# Altium schematic symbol library Centralize.SchLib: 1081 symbols (part 8 of 26)
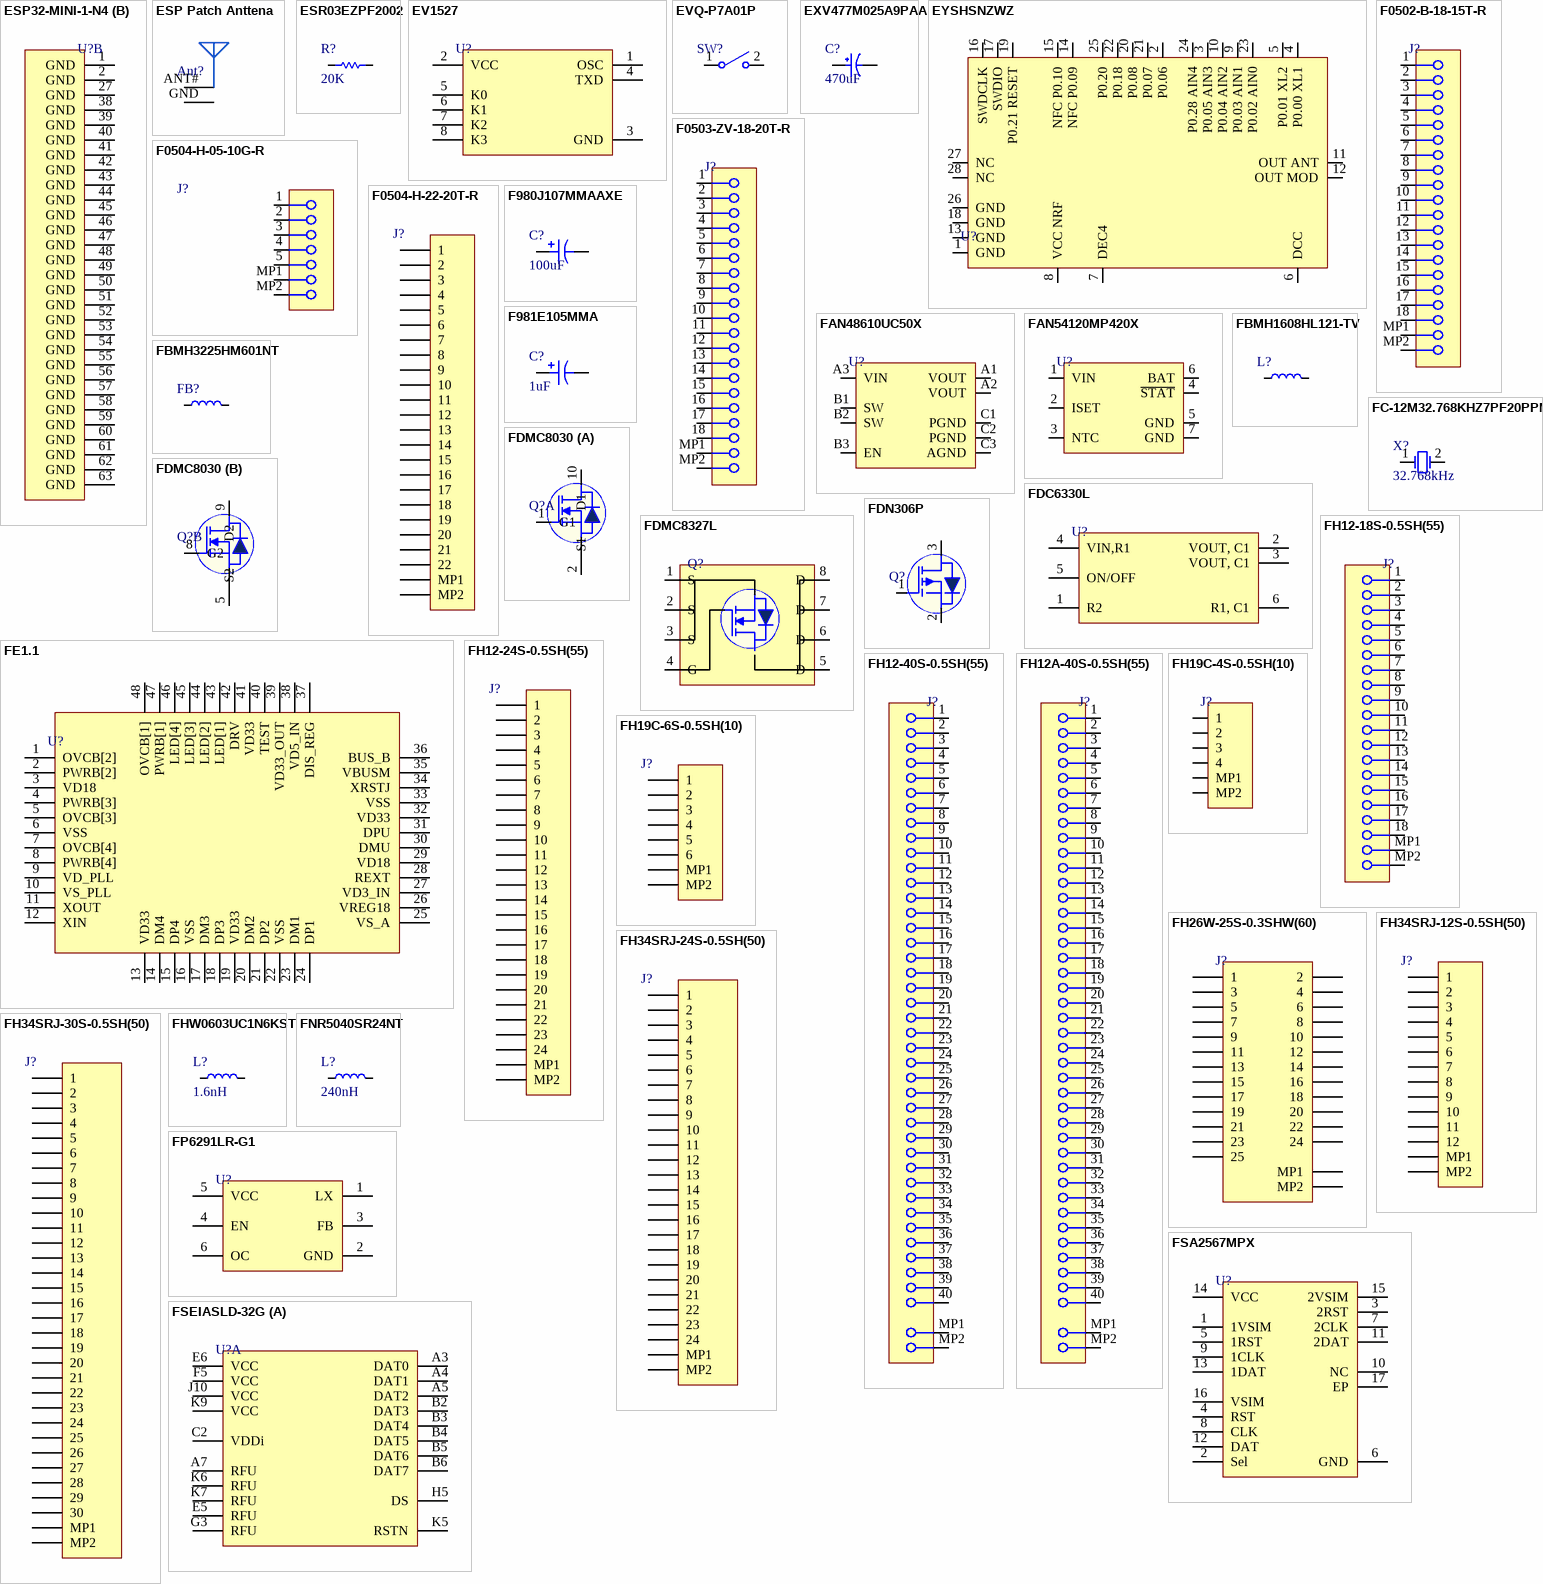
[diagram p54: symbols ESP32-MINI-1-N4 to FSEIASLD-32G]

## FDMC8030
designator Q?
MOSFET 2N-CH 40V 12A 8POWER33; Manufacturer: ON Semiconductor / Fairchild; Manufacturer Part Number: FDMC8030; Rise Time: 3ns; Rds On Max: 10mR; Input Capacitance: 1.975nF; Power Dissipation: 800mW; Turn-On Delay Time: 7ns; Turn-Off Delay Time: 19ns; Element Configuration: Dual; Gate to Source Voltage (Vgs): 12V; FET Type: 2 N-Channel; Polarity: N-CHANNEL; Number of Elements: 1; Supplier 1: Future Electronics; RoHS: Yes; Category: Uncategorized; Pricing 1: 3000=0.59500, 6000=0.57500 (USD); Mount: Surface Mount; Number of Pins: 8; Weight: 0.196g; Min Operating Temperature: -55°C; Max Operating Temperature: 150°C; Packaging: Tape and Reel; Package Quantity: 3000; Continuous Drain Current (ID): 12A; Drain to Source Breakdown Voltage: 40V; Drain to Source Resistance: 10mR; Drain to Source Voltage (Vdss): 40V; Max Power Dissipation: 800mW; Fall Time: 3ns; Series: PowerTrench®; Length: 3mm; Width: 3mm; Height: 0.75mm; Radiation Hardening: No; RoHS Compliant: Yes; ComponentLink1URL: https://datasheet.ciiva.com/11175/fdmc8030-11175489.pdf?src-supplier=Avnet; ComponentLink1Description: https://datasheet.ciiva.com/11175/fdmc8030-11175489.pdf?src-supplier=Avnet; ComponentLink2URL: https://datasheet.ciiva.com/4439/fdmc8030-103806-4439986.pdf?src-supplier=Mouser; ComponentLink2Description: https://datasheet.ciiva.com/4439/fdmc8030-103806-4439986.pdf?src-supplier=Mouser; ComponentLink3URL: https://datasheet.ciiva.com/15044/fdmc8030-15044346.pdf?src-supplier=Digi-Key; ComponentLink3Description: https://datasheet.ciiva.com/15044/fdmc8030-15044346.pdf?src-supplier=Digi-Key; Supplier Part Number 1: 4079668; LCSC Part Number: C890952; Item Type: Mosfet
footprint 8-Power33 (3x3)
part A pins: 1 G1, 2 S1, 10 D1
part B pins: 5 S2, 8 G2, 9 D2

## FDMC8327L
designator Q?
POWER FIELD-EFFECT TRANSISTOR, 1; Manufacturer: ON Semiconductor / Fairchild; Manufacturer Part Number: FDMC8327L; Rds On Max: 9.7mR; Input Capacitance: 1.85nF; Rise Time: 2.2ns; Drain to Source Voltage (Vdss): 40V; Continuous Drain Current (ID): 14A; Max Power Dissipation: 30W; Gate to Source Voltage (Vgs): 20V; Number of Elements: 1; Turn-On Delay Time: 8.4ns; Turn-Off Delay Time: 20ns; Threshold Voltage: 1.7V; Element Configuration: Single; Polarity: N-CHANNEL; Item Type: Mosfet; Supplier 1: RSComponents; RoHS: Yes; Category: Uncategorized; Stock 1: 12000; Pricing 1: 10=1.13200, 100=0.79800, 500=0.71800, 1000=0.59800 (GBP); Mount: Surface Mount; Number of Pins: 8; Weight: 0.18g; Min Operating Temperature: -55°C; Max Operating Temperature: 150°C; Package Quantity: 1; Packaging: Tape and Reel; Drain to Source Breakdown Voltage: 40V; Drain to Source Resistance: 9.7mR; Power Dissipation: 30W; Fall Time: 2.2ns; Series: PowerTrench®; Length: 3.3mm; Width: 3.3mm; Height: 0.75mm; Radiation Hardening: No; Reach SVHC Compliant: Yes; RoHS Compliant: Yes; ComponentLink1URL: https://datasheet.ciiva.com/13060/fdmc8327l-103580-13060051.pdf?src-supplier=Mouser; ComponentLink1Description: https://datasheet.ciiva.com/13060/fdmc8327l-103580-13060051.pdf?src-supplier=Mouser; ComponentLink2URL: https://datasheet.ciiva.com/29752/fdmc8327l-29752225.pdf?src-supplier=Digi-Key; ComponentLink2Description: https://datasheet.ciiva.com/29752/fdmc8327l-29752225.pdf?src-supplier=Digi-Key; ComponentLink3URL: https://datasheet.ciiva.com/7967/1774752-7967973.pdf?src-supplier=Element14; ComponentLink3Description: https://datasheet.ciiva.com/7967/1774752-7967973.pdf?src-supplier=Element14; ComponentLink4URL: https://datasheet.ciiva.com/29752/fdmc8327l-29752230.pdf?src-supplier=Digi-Key; ComponentLink4Description: https://datasheet.ciiva.com/29752/fdmc8327l-29752230.pdf?src-supplier=Digi-Key; ComponentLink5URL: https://datasheet.ciiva.com/11175/fdmc8327l-11175500.pdf?src-supplier=Avnet; ComponentLink5Description: https://datasheet.ciiva.com/11175/fdmc8327l-11175500.pdf?src-supplier=Avnet; ComponentLink6URL: https://datasheet.ciiva.com/29752/fdmc8327l-29752220.pdf?src-supplier=Digi-Key; ComponentLink6Description: https://datasheet.ciiva.com/29752/fdmc8327l-29752220.pdf?src-supplier=Digi-Key; Supplier Part Number 1: 8648203P; LCSC Part Number: *
footprint 8-MLP (3.3x3.3)
pins: 1 S, 2 S, 3 S, 4 G, 5 D, 6 D, 7 D, 8 D

## FDN306P
designator Q?
MOSFET P-CH 12V 2.6A SUPERSOT3; Manufacturer: ON Semiconductor / Fairchild; Manufacturer Part Number: FDN306P; Rds On Max: 40mR; Input Capacitance: 1.138nF; Max Power Dissipation: 500mW; Gate to Source Voltage (Vgs): 8V; Number of Elements: 1; Turn-Off Delay Time: 38ns; Turn-On Delay Time: 11ns; Element Configuration: Single; Rise Time: 10ns; Threshold Voltage: -600mV; Drain to Source Breakdown Voltage: -12V; Polarity: P-CHANNEL; Current Rating: -2.6A; Current: 26A; Supplier 1: Digi-Key; RoHS: Yes; Category: MOSFETs; Stock 1: 12409; Pricing 1: 1=0.59000, 10=0.50700, 25=0.47360, 100=0.37880, 500=0.29766, 1000=0.23001 (USD); Mount: Surface Mount; Case/Package: TO-236-3; Number of Pins: 3; Contact Plating: Tin,Matte; Min Operating Temperature: -55°C; Max Operating Temperature: 150°C; Packaging: Tape and Reel; Package Quantity: 3000; Drain to Source Voltage (Vdss): 12V; Continuous Drain Current (ID): 2.6A; Drain to Source Resistance: 40mR; Power Dissipation: 500mW; Series: PowerTrench®; Fall Time: 10ns; Nominal Vgs: -600mV; On-State Resistance: 40MR; Drain-source On Resistance-Max: 40MR; Dual Supply Voltage: -12V; Termination: SMD/SMT; Voltage Rating (DC): -12V; Voltage: 12V; Length: 2.92mm; Width: 1.4mm; Height: 0.94mm; Radiation Hardening: No; REACH SVHC: No SVHC; RoHS Compliant: Yes; Lead Free: Lead Free; ComponentLink1URL: https://datasheet.ciiva.com/6383/fdn306p-6383301.pdf?src-supplier=Digi-Key; ComponentLink1Description: https://datasheet.ciiva.com/6383/fdn306p-6383301.pdf?src-supplier=Digi-Key; ComponentLink2URL: https://datasheet.ciiva.com/4439/fdn306p-50876-4439911.pdf?src-supplier=Mouser; ComponentLink2Description: https://datasheet.ciiva.com/4439/fdn306p-50876-4439911.pdf?src-supplier=Mouser; ComponentLink3URL: https://datasheet.ciiva.com/27050/889760-27050636.pdf?src-supplier=Jameco; ComponentLink3Description: https://datasheet.ciiva.com/27050/889760-27050636.pdf?src-supplier=Jameco; ComponentLink4URL: https://datasheet.ciiva.com/14170/fdn306p-eng-tds-14170925.pdf?src-supplier=Distrelec; ComponentLink4Description: https://datasheet.ciiva.com/14170/fdn306p-eng-tds-14170925.pdf?src-supplier=Distrelec; ComponentLink5URL: https://datasheet.ciiva.com/22700/264983-22700885.pdf?src-supplier=Element14; ComponentLink5Description: https://datasheet.ciiva.com/22700/264983-22700885.pdf?src-supplier=Element14; ComponentLink6URL: https://datasheet.ciiva.com/26144/fdn306p-26144214.pdf?src-supplier=Avnet+Europe; ComponentLink6Description: https://datasheet.ciiva.com/26144/fdn306p-26144214.pdf?src-supplier=Avnet+Europe; ComponentLink7URL: https://datasheet.ciiva.com/6383/fdn306p-6383304.pdf?src-supplier=Digi-Key; ComponentLink7Description: https://datasheet.ciiva.com/6383/fdn306p-6383304.pdf?src-supplier=Digi-Key; ComponentLink8URL: https://datasheet.ciiva.com/11175/fdn306p-11175160.pdf?src-supplier=Avnet; ComponentLink8Description: https://datasheet.ciiva.com/11175/fdn306p-11175160.pdf?src-supplier=Avnet; ComponentLink9URL: https://datasheet.ciiva.com/6383/fdn306p-6383306.pdf?src-supplier=Digi-Key; ComponentLink9Description: https://datasheet.ciiva.com/6383/fdn306p-6383306.pdf?src-supplier=Digi-Key; ComponentLink10URL: https://datasheet.ciiva.com/17275/fdn306p-17275114.pdf?src-supplier=Future+Electronics; ComponentLink10Description: https://datasheet.ciiva.com/17275/fdn306p-17275114.pdf?src-supplier=Future+Electronics; ComponentLink11URL: https://datasheet.ciiva.com/22655/fdn306p-22655327.pdf?src-supplier=Element14; ComponentLink11Description: https://datasheet.ciiva.com/22655/fdn306p-22655327.pdf?src-supplier=Element14; Supplier Part Number 1: FDN306PCT-ND; LCSC Part Number: C154510
footprint SOT-23 (TRANS NPN 40V 0.6A SOT23)
pins: 1 G, 2 S, 3 D

## FE1.1
designator U?
LQFP-48_7x7x05P USB ICs ROHS; Manufacturer: Terminus Tech; Manufacturer Part Number: FE1.1; Item Type: IC; Package: LQFP-48_7x7x05P; LCSC Part Number: C28958; ComponentLink1Description: LCSC; ComponentLink1URL: https://www.lcsc.com/product-detail/USB-ICs_Terminus-Tech-FE1-1_C28958.html
footprint 48-LQFP (7x7)_
pins: 1 OVCB[2], 2 PWRB[2], 3 VD18, 4 PWRB[3] , 5 OVCB[3], 6 VSS , 7 OVCB[4] , 8 PWRB[4] , 9 VD_PLL , 10 VS_PLL , 11 XOUT, 12 XIN, 13 VD33 , 14 DM4, 15 DP4, 16 VSS , 17 DM3, 18 DP3 , 19 VD33, 20 DM2, 21 DP2, 22 VSS, 23 DM1, 24 DP1, 25 VS_A, 26 VREG18, 27 VD3_IN, 28 REXT, 29 VD18, 30 DMU, 31 DPU, 32 VD33, 33 VSS, 34 XRSTJ, 35 VBUSM, 36 BUS_B, 37 DIS_REG, 38 VD5_IN, 39 VD33_OUT, 40 TEST, 41 VD33, 42 DRV, 43 LED[1], 44 LED[2], 45 LED[3], 46 LED[4], 47 PWRB[1], 48 OVCB[1]

## FH12-18S-0.5SH(55)
designator J?
CONN FFC BOTTOM 18POS 0.5MM R/A; Manufacturer: Hirose; Manufacturer Part Number: FH12-18S-0.5SH(55); Item Type: FPC Connector; Supplier: Future Electronics; Supplier Part Number: 3036611; RoHS: Yes; Category: FFC / FPC; Stock: 2000; Pricing: 2000=1.08 (USD); ComponentLink1URL: https://datasheet.ciiva.com/15176/getdatasheetpartid-437464-15176850.pdf?src-supplier=Verical; ComponentLink1Description: https://datasheet.ciiva.com/15176/getdatasheetpartid-437464-15176850.pdf?src-supplier=Verical; ComponentLink2URL: https://datasheet.ciiva.com/22630/58803-22630341.pdf?src-supplier=Farnell; ComponentLink2Description: https://datasheet.ciiva.com/22630/58803-22630341.pdf?src-supplier=Farnell; LCSC Part Number: C506792
footprint FH12-18S-0.5SH(55)
pins: 1, 2, 3, 4, 5, 6, 7, 8, 9, 10, 11, 12, 13, 14, 15, 16, 17, 18, MP1, MP2

## FH12-24S-0.5SH(55)
designator J?
CONN FFC BOTTOM 24POS 0.50MM R/A; Manufacturer: Hirose; Manufacturer Part Number: FH12-24S-0.5SH(55); Item Type: FFC Connector; Supplier 1: RSComponents; RoHS: Yes; Category: FFC / FPC; Stock 1: 30; Pricing 1: 5=0.91700, 100=0.76200, 375=0.63900, 1500=0.59600, 3000=0.55300 (USD); ComponentLink1URL: https://datasheet.ciiva.com/15176/getdatasheetpartid-439675-15176853.pdf?src-supplier=Verical; ComponentLink1Description: https://datasheet.ciiva.com/15176/getdatasheetpartid-439675-15176853.pdf?src-supplier=Verical; ComponentLink2URL: https://datasheet.ciiva.com/22630/58803-22630351.pdf?src-supplier=Farnell; ComponentLink2Description: https://datasheet.ciiva.com/22630/58803-22630351.pdf?src-supplier=Farnell; ComponentLink3URL: https://datasheet.ciiva.com/5137/ed-fh12-20140305-355586-5137161.pdf?src-supplier=Mouser; ComponentLink3Description: https://datasheet.ciiva.com/5137/ed-fh12-20140305-355586-5137161.pdf?src-supplier=Mouser; ComponentLink4URL: https://datasheet.ciiva.com/22697/58803-22697094.pdf?src-supplier=Element14; ComponentLink4Description: https://datasheet.ciiva.com/22697/58803-22697094.pdf?src-supplier=Element14; ComponentLink5URL: https://datasheet.ciiva.com/7661/58803-7661382.pdf?src-supplier=Element14; ComponentLink5Description: https://datasheet.ciiva.com/7661/58803-7661382.pdf?src-supplier=Element14; Supplier Part Number 1: 7388827; LCSC Part Number: C202112
footprint FH12-24S-0.5SH(55)_
pins: 1, 2, 3, 4, 5, 6, 7, 8, 9, 10, 11, 12, 13, 14, 15, 16, 17, 18, 19, 20, 21, 22, 23, 24, MP1, MP2

## FH12-40S-0.5SH(55)
designator J?
CONN FFC BOTTOM 40POS 0.50MM R/A; Manufacturer: Hirose; Manufacturer Part Number: FH12-40S-0.5SH(55); Connector Type: CARD EDGE CONNECTOR; Option: General Purpose; Filter Feature: No; Number of Rows Loaded: 1; Number of Contacts: 40; Contact Pattern: RECTANGULAR; Contact Resistance: 50mR; Contact Style: BELLOWED TYPE; Dielectric Withstanding Voltage (AC): 150V; Durability: 20Cycles; Insulation Resistance: 500MR; Rated Current (Signal): 400mA; Body Breadth: 0.079inch; Body Depth: 0.22inch; Body Length: 0.949inch; Mating Contact Pitch: 0.02inch; Mounting Option 1: EJECT LEVER; Mounting Option 2: LOCKING; Reference Standard: UL; Reliability: COMMERCIAL; Item Type: Connector; Supplier 1: Digi-Key; RoHS: Yes; Category: FFC / FPC; Stock 1: 11247; Pricing 1: 1=3.00000, 10=2.72800, 25=2.58400, 50=2.52400, 100=2.40380, 250=2.10332, 500=2.04324, 1000=1.74276 (USD); Mounting Technology: Board; Contact Finish - Mating: NOT SPECIFIED; Contact Finish - Termination: Nickel/Gold (Ni/Au); Insulation Color: Beige; Insulation Material: Polyamide; Min Operating Temperature: -40°C; Max Operating Temperature: 70°C; JESD-609 Code: e4; Contact Gender: Female; Mixed Contacts: No; Mounting Style: RIGHT ANGLE; Termination: SMD/SMT; Number Of PCB Rows: 1; PCB Contact Pattern: RECTANGULAR; Terminal Pitch: 0.5mm; Flammability Rating: UL94 V-0; RoHS Compliant: Yes; DIN Conformance: No; IEC Conformance: No; MIL Conformance: No; Reach SVHC Compliant: Yes; ComponentLink1URL: https://datasheet.ciiva.com:443/pdfs/VipMasterIC/IC/HIRO/HIRO-S-A0003089604/HIRO-S-A0008599618-1.pdf?src-supplier=IHS+Markit; ComponentLink1Description: https://datasheet.ciiva.com:443/pdfs/VipMasterIC/IC/HIRO/HIRO-S-A0003089604/HIRO-S-A0008599618-1.pdf?src-supplier=IHS+Markit; ComponentLink2URL: https://datasheet.ciiva.com/11745/0900766b80d985fc-11745617.pdf?src-supplier=RSComponents; ComponentLink2Description: https://datasheet.ciiva.com/11745/0900766b80d985fc-11745617.pdf?src-supplier=RSComponents; ComponentLink3URL: https://datasheet.ciiva.com/15176/getdatasheetpartid-432539-15176843.pdf?src-supplier=Verical; ComponentLink3Description: https://datasheet.ciiva.com/15176/getdatasheetpartid-432539-15176843.pdf?src-supplier=Verical; ComponentLink4URL: https://datasheet.ciiva.com/7661/58803-7661389.pdf?src-supplier=Element14; ComponentLink4Description: https://datasheet.ciiva.com/7661/58803-7661389.pdf?src-supplier=Element14; Supplier Part Number 1: 26-FH12-40S-0.5SH(55)CT-ND; LCSC Part Number: C202114
footprint FH12-40S-0.5SH(55)
pins: 1, 2, 3, 4, 5, 6, 7, 8, 9, 10, 11, 12, 13, 14, 15, 16, 17, 18, 19, 20, 21, 22, 23, 24, 25, 26, 27, 28, 29, 30, 31, 32, 33, 34, 35, 36, 37, 38, 39, 40, MP1, MP2

## FH12A-40S-0.5SH(55)
designator J?
CONN FFC TOP 40POS 0.50MM R/A; Manufacturer: Hirose; Manufacturer Part Number: FH12A-40S-0.5SH(55); Connector Type: CARD EDGE CONNECTOR; Option: General Purpose; Contact Pattern: RECTANGULAR; Contact Style: BELLOWED TYPE; Filter Feature: No; Number Of PCB Rows: 1; Number of Contacts: 40; Board Mounting Option: SOLDER HOLDING POSTS; Contact Resistance: 50mR; Dielectric Withstanding Voltage (AC): 150V; Durability: 20Cycles; Insulation Resistance: 500MR; Rated Current (Signal): 500mA; Additional Feature: ROHS COMPLIANT; Body Breadth: 0.079inch; Body Length: 0.965inch; Mating Contact Pitch: 0.02inch; Mounting Option 1: LOCKING; Body Depth: 0.276inch; Reference Standard: UL; Reliability: COMMERCIAL; Item Type: FFC Connector; Supplier 1: Rs; RoHS: Yes; Category: FFC / FPC; Stock 1: 1020; Pricing 1: 200=1.21900, 750=1.09200, 3000=0.99700, 6000=0.89700 (GBP); Mounting Technology: Board; Contact Material: Bronze; Contact Finish - Mating: GOLD (8); Contact Finish - Termination: Gold (Au) - with Nickel (Ni) barrier; Insulation Color: Beige; Insulation Material: Polyamide; Min Operating Temperature: -40°C; Max Operating Temperature: 85°C; JESD-609 Code: e4; Contact Gender: Female; Mixed Contacts: No; Mounting Style: RIGHT ANGLE; Number of Rows Loaded: 1; PCB Contact Pattern: RECTANGULAR; Termination: SMD/SMT; Terminal Pitch: 0.5mm; Flammability Rating: UL94 V-0; RoHS Compliant: Yes; DIN Conformance: No; IEC Conformance: No; MIL Conformance: No; Reach SVHC Compliant: Yes; ComponentLink1URL: https://datasheet.ciiva.com:443/pdfs/VipMasterIC/IC/HIRO/HIRO-S-A0001800623/HIRO-S-A0003173477-1.pdf?src-supplier=IHS+Markit; ComponentLink1Description: https://datasheet.ciiva.com:443/pdfs/VipMasterIC/IC/HIRO/HIRO-S-A0001800623/HIRO-S-A0003173477-1.pdf?src-supplier=IHS+Markit; ComponentLink2URL: https://datasheet.ciiva.com/14667/0900766b80806912-14667338.pdf?src-supplier=Rs; ComponentLink2Description: https://datasheet.ciiva.com/14667/0900766b80806912-14667338.pdf?src-supplier=Rs; ComponentLink3URL: https://datasheet.ciiva.com/15176/getdatasheetpartid-432540-15176844.pdf?src-supplier=Verical; ComponentLink3Description: https://datasheet.ciiva.com/15176/getdatasheetpartid-432540-15176844.pdf?src-supplier=Verical; ComponentLink4URL: https://datasheet.ciiva.com/11745/0900766b80d985fc-11745193.pdf?src-supplier=Rs; ComponentLink4Description: https://datasheet.ciiva.com/11745/0900766b80d985fc-11745193.pdf?src-supplier=Rs; Supplier Part Number 1: 6882839P; LCSC Part Number: C506795
footprint FH12A-40S-0.5SH(55)
pins: 1, 2, 3, 4, 5, 6, 7, 8, 9, 10, 11, 12, 13, 14, 15, 16, 17, 18, 19, 20, 21, 22, 23, 24, 25, 26, 27, 28, 29, 30, 31, 32, 33, 34, 35, 36, 37, 38, 39, 40, MP1, MP2

## FH19C-4S-0.5SH(10)
designator J?
CONN FFC BOTTOM 4POS 0.5MM R/A; Manufacturer: Hirose; Manufacturer Part Number: FH19C-4S-0.5SH(10); Actuator Material: Polymer,Polyphenylene,Liquid Crystal Polymer; Voltage Rating: 50V; Current Rating: 500mA; Number of Positions: 4; Insulation Resistance: 500MR; Wire/Cable Type: Flat Flex; Pitch: 0.02inch; Item Type: FPC Connector; Supplier 1: Digi-Key; RoHS: Yes; Category: FFC / FPC; Stock 1: 7956; Pricing 1: 1=1.08, 10=0.916, 25=0.878, 50=0.8596, 100=0.8221, 250=0.7474, 500=0.67266, 1000=0.59792, 2500=0.54186 (USD); Mounting Technology: Surface Mount; Contact Material: Bronze; Contact Plating: Gold; Housing Material: Polymer; Min Operating Temperature: -55°C; Max Operating Temperature: 85°C; Packaging: Tape and Reel; Package Quantity: 5000; Termination: Solder; Series: FH19C; Flammability Rating: UL94 V-0; RoHS Compliant: Yes; ComponentLink1URL: https://datasheet.ciiva.com/18563/ed-fh19cfh19sc-20140305-18563548.pdf?src-supplier=Digi-Key; ComponentLink1Description: https://datasheet.ciiva.com/18563/ed-fh19cfh19sc-20140305-18563548.pdf?src-supplier=Digi-Key; Supplier Part Number 1: H125822CT-ND; LCSC Part Number: C424650
footprint FH19C-4S-0.5SH(10)
pins: 1, 2, 3, 4, MP1, MP2

## FH19C-6S-0.5SH(10)
designator J?
CONN FFC BOTTOM 6POS 0.50MM R/A; Manufacturer: Hirose; Manufacturer Part Number: FH19C-6S-0.5SH(10); Item Type: FFC Connector; Supplier 1: Digi-Key; RoHS: Yes; Category: FFC / FPC; Stock 1: 4697; Pricing 1: 1=1.10000, 10=0.96900, 25=0.91200, 50=0.87400, 100=0.83600, 250=0.76000, 500=0.68400, 1000=0.60800, 2500=0.55100 (USD); ComponentLink1URL: https://datasheet.ciiva.com/18563/ed-fh19cfh19sc-20140305-18563530.pdf?src-supplier=Digi-Key; ComponentLink1Description: https://datasheet.ciiva.com/18563/ed-fh19cfh19sc-20140305-18563530.pdf?src-supplier=Digi-Key; Supplier Part Number 1: H125824CT-ND; LCSC Part number: C424651
footprint FH19C-6S-0.5SH(10)_
pins: 1, 2, 3, 4, 5, 6, MP1, MP2

## FH26W-25S-0.3SHW(60)
designator J?
CONN FPC BOTTOM 25POS 0.3MM R/A; Manufacturer: Hirose; Manufacturer Part Number: FH26W-25S-0.3SHW(60); Item Type: FPC Connector; Supplier 1: Future Electronics; RoHS: Yes; Category: FFC / FPC; Stock 1: 5000; Pricing 1: 5000=0.85500 (USD); ComponentLink1URL: https://www.hirose.com/product/en/download_file/key_name/FH26/category/Catalog/doc_file_id/49355/?file_category_id=4&item_id=298&is_series=1&src-supplier=Digi-Key; ComponentLink1Description: https://www.hirose.com/product/en/download_file/key_name/FH26/category/Catalog/doc_file_id/49355/?file_category_id=4&item_id=298&is_series=1&src-supplier=Digi-Key; ComponentLink2URL: https://www.hirose.com/product/download/?distributor=digikey&amp;type=2d&amp;lang=en&amp;num=FH26W-13S-0.3SHW(60)&src-supplier=Digi-Key; ComponentLink2Description: https://www.hirose.com/product/download/?distributor=digikey&amp;type=2d&amp;lang=en&amp;num=FH26W-13S-0.3SHW(60)&src-supplier=Digi-Key; ComponentLink3URL: https://www.hirose.com/product/download/?distributor=digikey&amp;type=specSheet&amp;lang=en&amp;num=FH26W-25S-0.3SHW(60)&src-supplier=Digi-Key; ComponentLink3Description: https://www.hirose.com/product/download/?distributor=digikey&amp;type=specSheet&amp;lang=en&amp;num=FH26W-25S-0.3SHW(60)&src-supplier=Digi-Key; Supplier Part Number 1: 6089120; LCSC Part Number: C2904698
footprint FH26W-25S-0.3SHW(60)
pins: 1, 2, 3, 4, 5, 6, 7, 8, 9, 10, 11, 12, 13, 14, 15, 16, 17, 18, 19, 20, 21, 22, 23, 24, 25, MP1, MP2

## FH34SRJ-12S-0.5SH(50)
designator J?
CONN FPC/FFC 12POS .5MM; Manufacturer: Hirose; Manufacturer Part Number: FH34SRJ-12S-0.5SH(50); Item Type: FFC Connector; Supplier 1: Digi-Key; RoHS: Yes; Category: FFC / FPC; Pricing 1: 5000=0.47775 (USD); ComponentLink1URL: https://www.hirose.com/product/en/download_file/key_name/FH34SRJ/category/Catalog/doc_file_id/31646/?file_category_id=4&item_id=27&is_series=1&src-supplier=Digi-Key; ComponentLink1Description: https://www.hirose.com/product/en/download_file/key_name/FH34SRJ/category/Catalog/doc_file_id/31646/?file_category_id=4&item_id=27&is_series=1&src-supplier=Digi-Key; Supplier Part Number 1: FH34SRJ-12S-0.5SH(50)-ND; LCSC Part Number: C424659
footprint FH34SRJ-12S-0.5SH(50)_
pins: 1, 2, 3, 4, 5, 6, 7, 8, 9, 10, 11, 12, MP1, MP2

## FH34SRJ-24S-0.5SH(50)
designator J?
CONN FPC/FFC 24POS .5MM; Manufacturer: Hirose; Manufacturer Part Number: FH34SRJ-24S-0.5SH(50); Supplier 1: Digi-Key; RoHS: Yes; Category: FFC / FPC; Stock 1: 5000; Pricing 1: 5000=0.53562 (USD); ComponentLink1URL: https://www.hirose.com/product/download/?distributor=digikey&amp;type=specSheet&amp;lang=en&amp;num=FH34SRJ-24S-0.5SH(50)&src-supplier=Digi-Key; ComponentLink1Description: https://www.hirose.com/product/download/?distributor=digikey&amp;type=specSheet&amp;lang=en&amp;num=FH34SRJ-24S-0.5SH(50)&src-supplier=Digi-Key; Supplier Part Number 1: FH34SRJ-24S-0.5SH(50)-ND; LCSC Part Number: C324726
footprint FH34SRJ-24S-0.5SH(50)
pins: 1, 2, 3, 4, 5, 6, 7, 8, 9, 10, 11, 12, 13, 14, 15, 16, 17, 18, 19, 20, 21, 22, 23, 24, MP1, MP2

## FH34SRJ-30S-0.5SH(50)
designator J?
CONN FFC FPC 30POS 0.50MM R/A; Manufacturer: Hirose; Manufacturer Part Number: FH34SRJ-30S-0.5SH(50); Supplier 1: Digi-Key; RoHS: Yes; Category: FFC / FPC; Stock 1: 12205; Pricing 1: 1=1.25000, 10=1.05500, 25=1.01240, 50=0.99080, 100=0.94770, 250=0.86152, 500=0.77538, 1000=0.68922, 2500=0.62461 (USD); ComponentLink1URL: https://datasheet.ciiva.com/46408/1693466-46408167.pdf?src-supplier=Element14; ComponentLink1Description: https://datasheet.ciiva.com/46408/1693466-46408167.pdf?src-supplier=Element14; Supplier Part Number 1: HFT430CT-ND; LCSC Part Number: C324727
footprint FH34SRJ-30S-0.5SH(50)_
pins: 1, 2, 3, 4, 5, 6, 7, 8, 9, 10, 11, 12, 13, 14, 15, 16, 17, 18, 19, 20, 21, 22, 23, 24, 25, 26, 27, 28, 29, 30, MP1, MP2

## FHW0603UC1N6KST
designator L?, comment 1.6nH
700mA 1.6nH ±10% 40mΩ 0603 Inductors (SMD) ROHS; Manufacturer Part Number: FHW0603UC1N6KST; Manufacturer: FH; Footprint: 0603; Value: 1.6nH; LCSC Part Number: C317978; ComponentLink1Description: LCSC; ComponentLink1URL: https://www.lcsc.com/product-detail/Inductors-SMD_FH-Guangdong-Fenghua-Advanced-Tech-FHW0603UC1N6KST_C317978.html
footprint IND-0603 (1608 Metric) (0.063" L x 0.032" W (1.60mm x 0.80mm))
pins: 1, 2

## FNR5040SR24NT
designator L?, comment 240nH
6.4A 240nH ±30% 8mΩ SMD Power Inductors ROHS; Manufacturer: cjiang; Manufacturer Part Number: FNR5040SR24NT; Footprint: Custom; ComponentLink1Description: LCSC; ComponentLink1URL: https://www.lcsc.com/product-detail/span-style-background-color-ff0-Power-span-span-style-background-color-ff0-Inductors-span_cjiang-Changjiang-Microelectronics-Tech-FNR5040SR24NT_C167951.html; LCSC Part Number: C167951
footprint FNR5040SR24NT_
pins: 1, 2

## FP6291LR-G1
designator U?
boost converterType 12V 2A 2.6V~5.5V SOT-23-6 DC-DC Converters ROHS; Manufacturer: Advanced Analog Technology; Manufacturer Part Number: FP6291LR-G1; Item Type: IC; Package: SOT-23-6; LCSC Part Number: C18701; ComponentLink1Description: LCSC; ComponentLink1URL: https://www.lcsc.com/product-detail/DC-DC-Converters_Advanced-Analog-Technology-FP6291LR-G1_C18701.html
footprint SOT-23-6
pins: 1 LX, 2 GND, 3 FB, 4 EN, 5 VCC, 6 OC

## FSA2567MPX
designator U?
IC SWITCH 4PDT 16MLP; Manufacturer: ON Semiconductor / Fairchild; Manufacturer Part Number: FSA2567MPX; Min Supply Voltage: 2.7V; Max Supply Voltage: 4.3V; Number of Inputs: 4; Number of Outputs: 8; Number of Channels: 1; Max Supply Current: 1uA; Power Dissipation: 500mW; Supply Type: Single; -3db Bandwidth: 475MHz; Supplier 1: Future Electronics; RoHS: Yes; Category: Interface ICs; Stock 1: 48000; Pricing 1: 3000=0.375, 6000=0.37, 9000=0.365, 12000=0.36 (USD); Mounting Technology: Surface Mount; Pins: 16; Weight: 0.126g; Min Operating Temperature: -40°C; Max Operating Temperature: 85°C; Packaging: Tape and Reel; Throw Configuration: 4PDT; Series: -; Supply Current: 1uA; Length: 3mm; Width: 3mm; Height: 0.75mm; Radiation Hardening: No; Reach SVHC Compliant: No; Lead Free: Lead Free; RoHS Compliant: Yes; ComponentLink1URL: https://datasheet.ciiva.com/4918/fsa2567-82876-4918495.pdf?src-supplier=Mouser; ComponentLink1Description: https://datasheet.ciiva.com/4918/fsa2567-82876-4918495.pdf?src-supplier=Mouser; ComponentLink2URL: https://datasheet.ciiva.com/17282/fsa2567-17282630.pdf?src-supplier=Future+Electronics; ComponentLink2Description: https://datasheet.ciiva.com/17282/fsa2567-17282630.pdf?src-supplier=Future+Electronics; ComponentLink3URL: https://datasheet.ciiva.com/2979/fsa2567-2979466.pdf?src-supplier=Avnet; ComponentLink3Description: https://datasheet.ciiva.com/2979/fsa2567-2979466.pdf?src-supplier=Avnet; ComponentLink4URL: https://datasheet.ciiva.com/6638/fsa2567-6638602.pdf?src-supplier=Digi-Key; ComponentLink4Description: https://datasheet.ciiva.com/6638/fsa2567-6638602.pdf?src-supplier=Digi-Key; ComponentLink5URL: https://datasheet.ciiva.com/6638/fsa2567-6638634.pdf?src-supplier=Digi-Key; ComponentLink5Description: https://datasheet.ciiva.com/6638/fsa2567-6638634.pdf?src-supplier=Digi-Key; ComponentLink6URL: https://datasheet.ciiva.com/2979/fsa2567-2979467.pdf?src-supplier=Avnet; ComponentLink6Description: https://datasheet.ciiva.com/2979/fsa2567-2979467.pdf?src-supplier=Avnet; Supplier Part Number 1: 9108587; LCSC Part Number: C512961; Item Type: IC
footprint 16-MLP (3x3)
pins: 1 1VSIM, 2 Sel, 3 2RST, 4 RST, 5 1RST, 6 GND, 7 2CLK, 8 CLK, 9 1CLK, 10 NC, 11 2DAT, 12 DAT, 13 1DAT, 14 VCC, 15 2VSIM, 16 VSIM, 17 EP

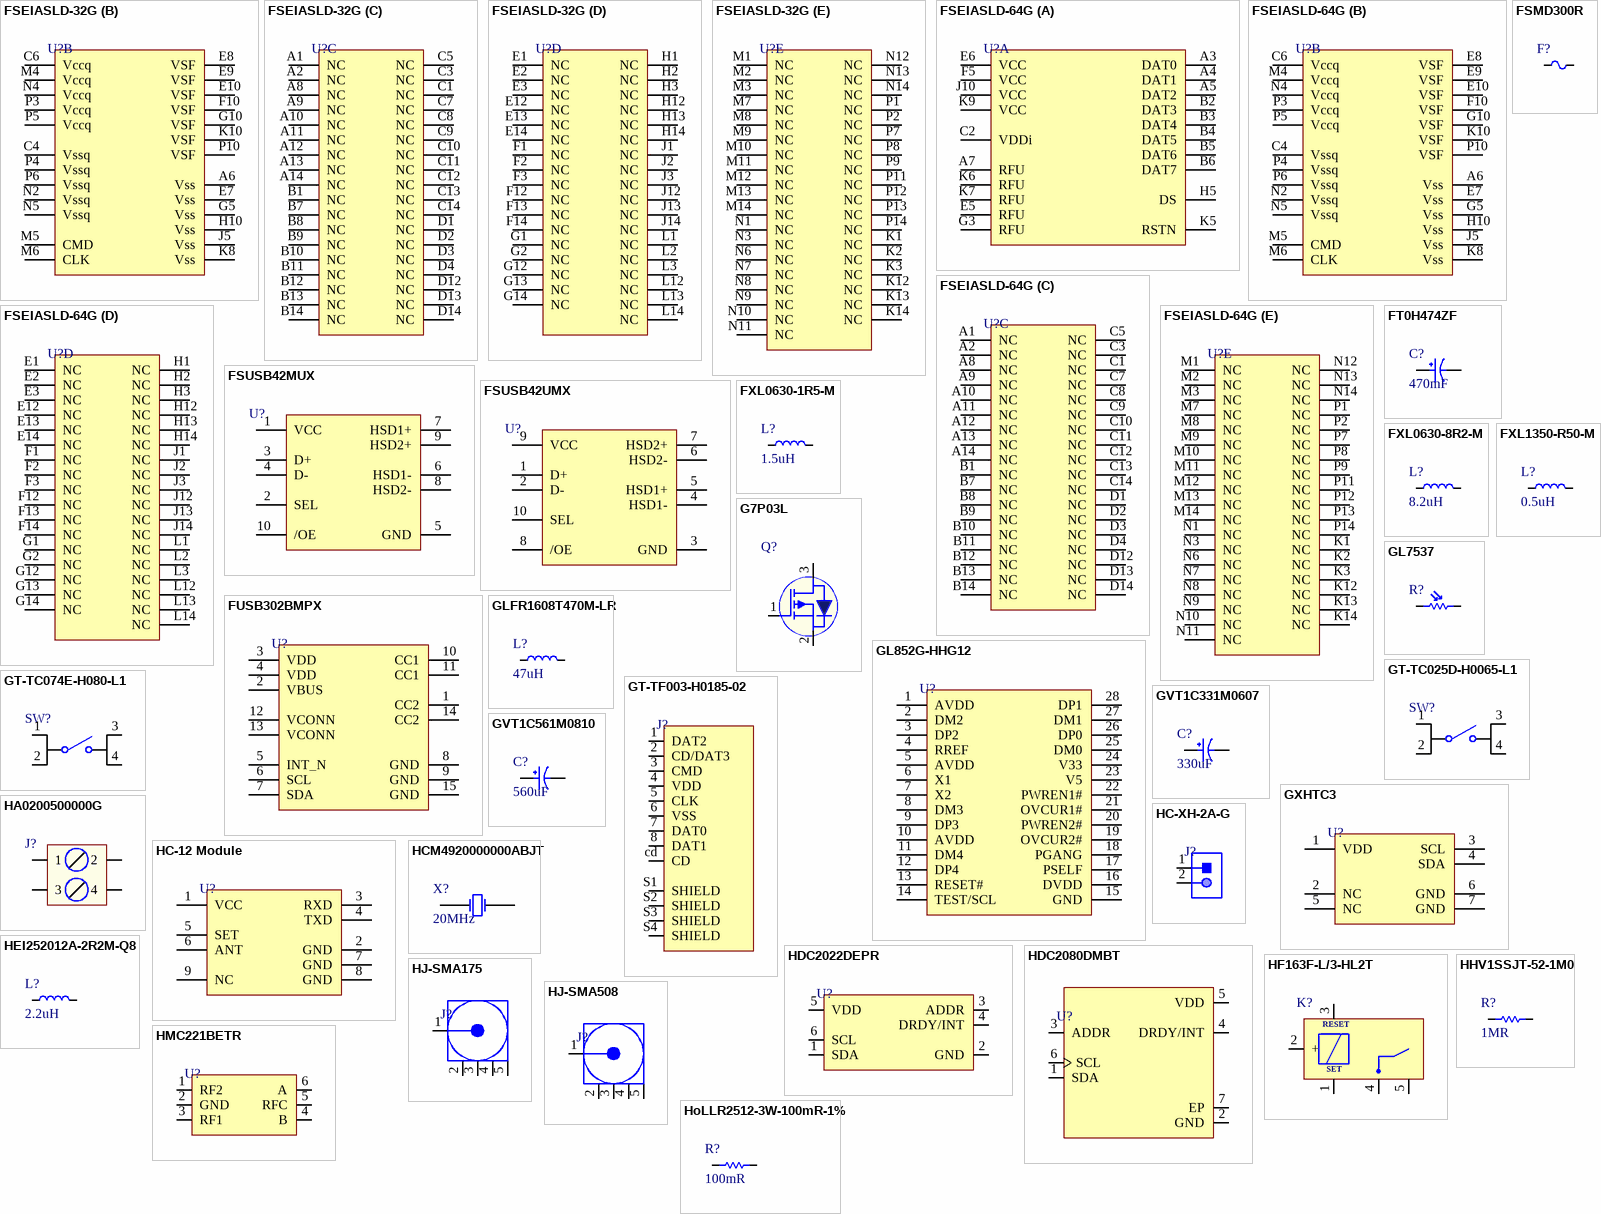
[diagram p9: symbols FSEIASLD-32G to HoLLR2512-3W-100mR-1%]

## FSEIASLD-32G
designator U?
BGA-153 eMMC ROHS; Manufacturer: FORESEE; Manufacturer Part Number: FSEIASLD-32G; Footprint: BGA-153; ComponentLink1Description: LCSC; ComponentLink1URL: https://www.lcsc.com/product-detail/eMMC_FORESEE-FSEIASLD-32G_C520991.html; LCSC Part Number: C520991
footprint BGA-153_
part A pins: A3 DAT0, A4 DAT1, A5 DAT2, A7 RFU, B2 DAT3, B3 DAT4, B4 DAT5, B5 DAT6, B6 DAT7, C2 VDDi, E5 RFU, E6 VCC, F5 VCC, G3 RFU, H5 DS, J10 VCC, K5 RSTN, K6 RFU, K7 RFU, K9 VCC
part B pins: A6 Vss, C4 Vssq, C6 Vccq, E7 Vss, E8 VSF, E9 VSF, E10 VSF, F10 VSF, G5 Vss, G10 VSF, H10 Vss, J5 Vss, K8 Vss, K10 VSF, M4 Vccq, M5 CMD, M6 CLK, N2 Vssq, N4 Vccq, N5 Vssq, P3 Vccq, P4 Vssq, P5 Vccq, P6 Vssq, P10 VSF
part C pins: A1 NC, A2 NC, A8 NC, A9 NC, A10 NC, A11 NC, A12 NC, A13 NC, A14 NC, B1 NC, B7 NC, B8 NC, B9 NC, B10 NC, B11 NC, B12 NC, B13 NC, B14 NC, C1 NC, C3 NC, C5 NC, C7 NC, C8 NC, C9 NC, C10 NC, C11 NC, C12 NC, C13 NC, C14 NC, D1 NC, D2 NC, D3 NC, D4 NC, D12 NC, D13 NC, D14 NC
part D pins: E1 NC, E2 NC, E3 NC, E12 NC, E13 NC, E14 NC, F1 NC, F2 NC, F3 NC, F12 NC, F13 NC, F14 NC, G1 NC, G2 NC, G12 NC, G13 NC, G14 NC, H1 NC, H2 NC, H3 NC, H12 NC, H13 NC, H14 NC, J1 NC, J2 NC, J3 NC, J12 NC, J13 NC, J14 NC, L1 NC, L2 NC, L3 NC, L12 NC, L13 NC, L14 NC
part E pins: K1 NC, K2 NC, K3 NC, K12 NC, K13 NC, K14 NC, M1 NC, M2 NC, M3 NC, M7 NC, M8 NC, M9 NC, M10 NC, M11 NC, M12 NC, M13 NC, M14 NC, N1 NC, N3 NC, N6 NC, N7 NC, N8 NC, N9 NC, N10 NC, N11 NC, N12 NC, N13 NC, N14 NC, P1 NC, P2 NC, P7 NC, P8 NC, P9 NC, P11 NC, P12 NC, P13 NC, P14 NC

## FSEIASLD-64G
designator U?
BGA-153 eMMC ROHS; Manufacturer: FORESEE; Manufacturer Part Number: FSEIASLD-64G; Footprint: BGA-153; ComponentLink1Description: LCSC; ComponentLink1URL: https://lcsc.com/product-detail/eMMC_FORESEE-FSEIASLD-64G_C719922.html; LCSC Part Number: C719922
footprint BGA-153_
part A pins: A3 DAT0, A4 DAT1, A5 DAT2, A7 RFU, B2 DAT3, B3 DAT4, B4 DAT5, B5 DAT6, B6 DAT7, C2 VDDi, E5 RFU, E6 VCC, F5 VCC, G3 RFU, H5 DS, J10 VCC, K5 RSTN, K6 RFU, K7 RFU, K9 VCC
part B pins: A6 Vss, C4 Vssq, C6 Vccq, E7 Vss, E8 VSF, E9 VSF, E10 VSF, F10 VSF, G5 Vss, G10 VSF, H10 Vss, J5 Vss, K8 Vss, K10 VSF, M4 Vccq, M5 CMD, M6 CLK, N2 Vssq, N4 Vccq, N5 Vssq, P3 Vccq, P4 Vssq, P5 Vccq, P6 Vssq, P10 VSF
part C pins: A1 NC, A2 NC, A8 NC, A9 NC, A10 NC, A11 NC, A12 NC, A13 NC, A14 NC, B1 NC, B7 NC, B8 NC, B9 NC, B10 NC, B11 NC, B12 NC, B13 NC, B14 NC, C1 NC, C3 NC, C5 NC, C7 NC, C8 NC, C9 NC, C10 NC, C11 NC, C12 NC, C13 NC, C14 NC, D1 NC, D2 NC, D3 NC, D4 NC, D12 NC, D13 NC, D14 NC
part D pins: E1 NC, E2 NC, E3 NC, E12 NC, E13 NC, E14 NC, F1 NC, F2 NC, F3 NC, F12 NC, F13 NC, F14 NC, G1 NC, G2 NC, G12 NC, G13 NC, G14 NC, H1 NC, H2 NC, H3 NC, H12 NC, H13 NC, H14 NC, J1 NC, J2 NC, J3 NC, J12 NC, J13 NC, J14 NC, L1 NC, L2 NC, L3 NC, L12 NC, L13 NC, L14 NC
part E pins: K1 NC, K2 NC, K3 NC, K12 NC, K13 NC, K14 NC, M1 NC, M2 NC, M3 NC, M7 NC, M8 NC, M9 NC, M10 NC, M11 NC, M12 NC, M13 NC, M14 NC, N1 NC, N3 NC, N6 NC, N7 NC, N8 NC, N9 NC, N10 NC, N11 NC, N12 NC, N13 NC, N14 NC, P1 NC, P2 NC, P7 NC, P8 NC, P9 NC, P11 NC, P12 NC, P13 NC, P14 NC

## FSMD300R
designator F?
6V 3A 100A 5A 1812 Resettable Fuses ROHS; Manufacturer: Fuzetec Tech; Manufacturer Part Number: FSMD300R; Item Type: Fuse; Package: 1812; LCSC Part Number: C181900; ComponentLink1Description: LCSC; ComponentLink1URL: https://www.lcsc.com/product-detail/Resettable-Fuses_Fuzetec-Tech-FSMD300R_C181900.html
footprint Fuse-1812_
pins: 1, 2

## FSUSB42MUX
designator U?
IC USB SWITCH DPDT 10MSOP; Manufacturer: ON Semiconductor / Fairchild; Manufacturer Part Number: FSUSB42MUX; Number of Outputs: 4; Data Rate: 480Mbps; Number of Channels: 2; Operating Supply Voltage: 4.3V; Min Supply Voltage: 3V; On-State Resistance: 6.5R; Current: 100mA; Supply Type: Single; Supplier 1: Digi-Key; Stock 1: 0; Pricing 1: 1=0.79, 10=0.693, 25=0.6508, 100=0.531, 250=0.4932, 500=0.41976, 1000=0.3465 (USD); Mount: Surface Mount; Case/Package: MSOP; Number of Pins: 10; Weight: 0.1125g; Min Operating Temperature: -40°C; Max Operating Temperature: 85°C; Packaging: Tape and Reel; Package Quantity: 1; Number of Inputs: 2; Max Supply Voltage: 4.3V; Voltage: 4.3V; Throw Configuration: DPDT; Series: -; Length: 3mm; Width: 3mm; Height: 0.85mm; Radiation Hardening: No; REACH SVHC: No SVHC; Lead Free: Lead Free; ComponentLink1URL: https://www.fairchildsemi.com/datasheets/FS/FSUSB42.pdf?src-supplier=Digi-Key; ComponentLink1Description: https://www.fairchildsemi.com/datasheets/FS/FSUSB42.pdf?src-supplier=Digi-Key; ComponentLink2URL: https://www.fairchildsemi.com/datasheets/FS/FSUSB42.pdf?src-supplier=Avnet; ComponentLink2Description: https://www.fairchildsemi.com/datasheets/FS/FSUSB42.pdf?src-supplier=Avnet; ComponentLink3URL: http://www.mouser.com/ds/2/149/FSUSB42-112719.pdf?src-supplier=Mouser; ComponentLink3Description: http://www.mouser.com/ds/2/149/FSUSB42-112719.pdf?src-supplier=Mouser; ComponentLink4URL: https://www.fairchildsemi.com/datasheets/FS/FSUSB42.pdf?src-supplier=Avnet+Europe; ComponentLink4Description: https://www.fairchildsemi.com/datasheets/FS/FSUSB42.pdf?src-supplier=Avnet+Europe; Supplier Part Number 1: FSUSB42MUXDKR-ND; LCSC Part Number: C11355; Item Type: IC
footprint 10-MSOP
pins: 1 VCC, 2 SEL, 3 D+, 4 D-, 5 GND, 6 HSD1-, 7 HSD1+, 8 HSD2-, 9 HSD2+, 10 /OE

## FSUSB42UMX
designator U?
IC USB SWITCH DPDT 10UMLP; Manufacturer: ON Semiconductor / Fairchild; Manufacturer Part Number: FSUSB42UMX; Number of Channels: 1; Min Supply Voltage: 3V; Max Supply Voltage: 4.3V; Nominal Supply Current: 1uA; On-State Resistance: 6.5R; Number of Inputs: 2; Data Rate: 480Mbps; Output Current: 100mA; Propagation Delay: 0.25ns; Bandwidth: 720MHz; Turn-Off Delay Time: 25ns; Turn-On Delay Time: 30ns; Supply Type: Single; Supplier 1: Digi-Key; Stock 1: 52036; Pricing 1: 1=0.6, 10=0.527, 25=0.4948, 100=0.4039, 250=0.37516, 500=0.31928, 1000=0.26355 (USD); Mount: Surface Mount; Number of Pins: 10; Weight: 18.08g; Min Operating Temperature: -40°C; Max Operating Temperature: 85°C; Package Quantity: 1; Series: -; Supply Current: 1uA; Number of Outputs: 2; Packaging: Tape and Reel; Operating Supply Voltage: 4.3V; Number of Ports: 2; Termination: SMD/SMT; Throw Configuration: DPDT; Length: 1.4mm; Width: 1.8mm; Height: 0.5mm; Radiation Hardening: No; REACH SVHC: No SVHC; Lead Free: Lead Free; RoHS Compliant: Yes; ComponentLink1URL: http://www.farnell.com/datasheets/2298664.pdf?src-supplier=Farnell; ComponentLink1Description: http://www.farnell.com/datasheets/2298664.pdf?src-supplier=Farnell; ComponentLink2URL: http://www.farnell.com/datasheets/1815547.pdf?src-supplier=Element14; ComponentLink2Description: http://www.farnell.com/datasheets/1815547.pdf?src-supplier=Element14; ComponentLink3URL: https://www.fairchildsemi.com/datasheets/FS/FSUSB42.pdf?src-supplier=Avnet; ComponentLink3Description: https://www.fairchildsemi.com/datasheets/FS/FSUSB42.pdf?src-supplier=Avnet; ComponentLink4URL: https://www.verical.com/server-webapp/html/getDatasheet?partID=189033&src-supplier=Verical; ComponentLink4Description: https://www.verical.com/server-webapp/html/getDatasheet?partID=189033&src-supplier=Verical; ComponentLink5URL: https://www.fairchildsemi.com/datasheets/FS/FSUSB42.pdf?src-supplier=Avnet+Europe; ComponentLink5Description: https://www.fairchildsemi.com/datasheets/FS/FSUSB42.pdf?src-supplier=Avnet+Europe; ComponentLink6URL: https://www.fairchildsemi.com/datasheets/FS/FSUSB42.pdf?src-supplier=Digi-Key; ComponentLink6Description: https://www.fairchildsemi.com/datasheets/FS/FSUSB42.pdf?src-supplier=Digi-Key; Supplier Part Number 1: FSUSB42UMXCT-ND; LCSC Part Number: C11145; Item Type: IC
footprint UMLP-10
pins: 1 D+, 2 D-, 3 GND, 4 HSD1-, 5 HSD1+, 6 HSD2-, 7 HSD2+, 8 /OE, 9 VCC, 10 SEL

## FT0H474ZF
designator C?, comment 470mF
CAP 470MF -20% +80% 5.5V T/H; Manufacturer: KEMET; Manufacturer Part Number: FT0H474ZF; ESR (Equivalent Series Resistance): 6.5R; Tolerance: 80%; Leakage Current: 710uA; Item Type: Capacitor; Supplier 1: RSComponents; RoHS: Yes; Category: Capacitors; Stock 1: 577; Pricing 1: 25=3.65000, 50=3.41000, 100=3.18000, 250=2.86000 (GBP); Mount: Through Hole; Case/Package: Radial; Min Operating Temperature: -40°C; Max Operating Temperature: 85°C; Packaging: Bulk; Capacitance: 470mF; Voltage Rating: 5.5V; Voltage Rating (DC): 5.5V; Package Quantity: 400; Termination: Radial; Voltage: 5.5V; Series: FT; Construction: Cylindrical; Diameter: 16.5mm; Length: 13mm; Lead Pitch: 5.08mm; Height - Seated (Max): 0.512inch; Depth: 13mm; Radiation Hardening: No; RoHS Compliant: Yes; Reach SVHC Compliant: Yes; ComponentLink1URL: https://datasheet.ciiva.com/29534/docfinderpartnumber-ft0h474zf-29534016.pdf?src-supplier=Digi-Key; ComponentLink1Description: https://datasheet.ciiva.com/29534/docfinderpartnumber-ft0h474zf-29534016.pdf?src-supplier=Digi-Key; ComponentLink2URL: https://datasheet.ciiva.com/46649/70368305-46649195.pdf?src-supplier=Allied+Electronics; ComponentLink2Description: https://datasheet.ciiva.com/46649/70368305-46649195.pdf?src-supplier=Allied+Electronics; ComponentLink3URL: https://datasheet.ciiva.com/29882/kem-s6014-ft-29882173.pdf?src-supplier=Avnet; ComponentLink3Description: https://datasheet.ciiva.com/29882/kem-s6014-ft-29882173.pdf?src-supplier=Avnet; Supplier Part Number 1: 7897980P; LCSC Part Number: *
footprint FT0H474ZF
pins: 1, 2

## FUSB302BMPX
designator U?
Full Speed Programmable USB Power Delivery Controller USB 3.1 3.3V T/R 14-Pin WQFN EP; Manufacturer: ON Semiconductor / Fairchild; Manufacturer Part Number: FUSB302MPX; Operating Supply Current: 25uA; Supplier 1: RSComponents; RoHS: Yes; Category: Integrated Circuits (ICs); Stock 1: 95; Pricing 1: 3000=0.62400 (GBP); Mount: Surface Mount; Min Operating Temperature: -40°C; Max Operating Temperature: 85°C; Interface: USB; Packaging: Cut Tape; RoHS Compliant: Yes; ComponentLink1URL: http://www.farnell.com/datasheets/2313409.pdf?src-supplier=Farnell; ComponentLink1Description: http://www.farnell.com/datasheets/2313409.pdf?src-supplier=Farnell; ComponentLink2URL: http://www.mouser.com/ds/2/149/FUSB302-769336.pdf?src-supplier=Mouser; ComponentLink2Description: http://www.mouser.com/ds/2/149/FUSB302-769336.pdf?src-supplier=Mouser; ComponentLink3URL: https://www.fairchildsemi.com/datasheets/FU/FUSB302.pdf?src-supplier=Digi-Key; ComponentLink3Description: https://www.fairchildsemi.com/datasheets/FU/FUSB302.pdf?src-supplier=Digi-Key; Supplier Part Number 1: 1464429; Supplier 2: Digi-Key; Stock 2: 9412; Pricing 2: 1=1.27000, 10=1.13500, 25=1.07720, 100=0.88500, 250=0.82728, 500=0.73108, 1000=0.57717 (USD); ComponentLink4URL: http://www.farnell.com/datasheets/2313408.pdf?src-supplier=Farnell; ComponentLink4Description: http://www.farnell.com/datasheets/2313408.pdf?src-supplier=Farnell; ComponentLink5URL: http://www.onsemi.com/pub/Collateral/FUSB302B-D.PDF?src-supplier=Digi-Key; ComponentLink5Description: http://www.onsemi.com/pub/Collateral/FUSB302B-D.PDF?src-supplier=Digi-Key; Supplier Part Number 2: FUSB302BMPXCT-ND; LCSC Part Number: C132291
footprint 14-MLP (2.5x2.5)_
pins: 1 CC2, 2 VBUS, 3 VDD, 4 VDD, 5 INT_N, 6 SCL, 7 SDA, 8 GND, 9 GND, 10 CC1, 11 CC1, 12 VCONN, 13 VCONN, 14 CC2, 15 GND

## FXL0630-1R5-M
designator L?, comment 1.5uH
IND SMD 12A 1.5uH ±20% 12.1mΩ; Manufacturer: cjiang(Changjiang Microelectronics Tech); Manufacturer Part Number: FXL0630-1R5-M; Item Type: Inductor; Rated Current: 12A; Inductance: 1.5uH; Tolerance: ±20%; DC Resistance (DCR): 12.1mΩ; ComponentLink1Description: LCSC; ComponentLink1URL: https://www.lcsc.com/product-detail/Power-Inductors_cjiang-Changjiang-Microelectronics-Tech-FXL0630-1R5-M_C167217.html; LCSC Part Number: C167217
footprint FXL0630-1R5-M_ (12A 1.5uH ±20% 12.1mO SMD Power Inductors)
pins: 1, 2

## FXL0630-8R2-M
designator L?, comment 8.2uH
5A 8.2uH ±20% 54mΩ 6A SMD,7x6.6x2.8mm Power Inductors ROHS; Manufacturer: Cjiang; Manufacturer Part Number: FXL0630-8R2-M; LCSC Part Number: C167222; Item Type: Inductor; ComponentLink1Description: LCSC; ComponentLink1URL: https://www.lcsc.com/product-detail/Power-Inductors_cjiang-Changjiang-Microelectronics-Tech-FXL0630-8R2-M_C167222.html
footprint FXL0630-8R2-M
pins: 1, 2

## FXL1350-R50-M
designator L?, comment 0.5uH
38A 0.5uH ±20% 48A SMD,13.45x12.6x4.8mm Power Inductors ROHS; Manufacture: cjiang (Changjiang Microelectronics Tech); Manufacture Part number: FXL1350-R50-M; Pakage: SMD,13.45x12.6x4.8mm; LCSC part number: C526008; Item type: Inductor; ComponentLink1Description: LCSC; ComponentLink1URL: https://www.lcsc.com/product-detail/Power-Inductors_cjiang-Changjiang-Microelectronics-Tech-FXL1350-R50-M_C526008.html
footprint FXL1350-R50-M
pins: 1, 2

## G7P03L
designator Q?
30V 7A 19mΩ 1.9W 1.1V@250uA P Channel SOT-23-3L MOSFETs ROHS; Manufacturer: GoFord; Manufacturer Part Number: G7P03L; Item Type: Mosfet; Supplier 1: Digi-Key; RoHS: No; Category: Uncategorized; Stock 1: 6672; Pricing 1: 1=0.45000, 10=0.36500, 100=0.24860, 500=0.18648, 1000=0.13986 (USD); LCSC Part Number: C840062; ComponentLink1Description: LCSC; ComponentLink1URL: https://www.lcsc.com/product-detail/MOSFETs_GOFORD-G7P03L_C840062.html
footprint SOT-23-3L_
pins: 1 G, 2 S, 3 D

## GL852G-HHG12
designator U?
SSOP-28-208mil USB ICs ROHS; Manufacturer: Genesys Logic; Manufacturer Part Number: GL852G-HHG12; Item Type: IC; LCSC Part Number: C136618; Package: SSOP-28-208mil; ComponentLink1Description: LCSC; ComponentLink1URL: https://www.lcsc.com/product-detail/USB-ICs_Genesys-Logic-GL852G-HHG12_C136618.html
footprint SSOP-28-208mil
pins: 1 AVDD, 2 DM2, 3 DP2, 4 RREF, 5 AVDD, 6 X1, 7 X2, 8 DM3, 9 DP3, 10 AVDD, 11 DM4, 12 DP4, 13 RESET#, 14 TEST/SCL, 15 GND, 16 DVDD, 17 PSELF, 18 PGANG, 19 OVCUR2#, 20 PWREN2#, 21 OVCUR1#, 22 PWREN1#, 23 V5, 24 V33, 25 DM0, 26 DP0, 27 DM1, 28 DP1

## GL7537
designator R?
8-20K Plugin Photoresistors ROHS; Manufacturer: JCHL(Shenzhen Jing Chuang He Li Tech); Manufacturer Part Number: GL7537; Vmax: 150V; Pmax: 100mW; ComponentLink1Description: LCSC; ComponentLink1URL: https://www.lcsc.com/product-detail/Photoresistors_JCHL-Shenzhen-Jing-Chuang-He-Li-Tech-GL7537_C559383.html; LCSC Part Number: C559383
footprint GL7537_ (Plugin Photoresistors ROHS)
pins: 1, 2

## GLFR1608T470M-LR
designator L?, comment 47uH
Inductor Power Chip Shielded Wirewound 47uH 20% 100mA 2.3Ohm DCR 0603; Manufacturer: TDK; Manufacturer Part Number: GLFR1608T470M-LR; Current Rating: 35mA; Saturation Current: 50mA; DC Resistance (DCR): 2.3R; Supplier 1: Farnell; RoHS: Yes; Category: Fixed Inductors; Pricing 1: 1=0.28600, 25=0.23800, 50=0.20000, 100=0.16500, 250=0.15200, 500=0.12800 (GBP); Mount: Surface Mount; Case/Package: 0603; Number of Pins: 2; Case Code (Metric): 1608; Case Code (Imperial): 0603; Min Operating Temperature: -40°C; Max Operating Temperature: 105°C; Inductance Tolerance: 20%; Package Quantity: 4000; Tolerance: 20%; Packaging: Tape and Reel; Shielding: Shielded; Inductance: 47uH; Max DC Current: 100mA; Termination: SMD/SMT; DC Current: 100mA; Series: GLFR; Length: 0.063inch; Width: 0.8mm; Height: 0.031inch; Depth: 1mm; REACH SVHC: No SVHC; Military Standard: Not; RoHS Compliant: Yes; ComponentLink1URL: https://datasheet.ciiva.com/1040/glfrseries-1040696.pdf?src-supplier=Digi-Key; ComponentLink1Description: https://datasheet.ciiva.com/1040/glfrseries-1040696.pdf?src-supplier=Digi-Key; ComponentLink2URL: https://datasheet.ciiva.com/1040/glfrseries-1040695.pdf?src-supplier=Digi-Key; ComponentLink2Description: https://datasheet.ciiva.com/1040/glfrseries-1040695.pdf?src-supplier=Digi-Key; ComponentLink3URL: https://datasheet.ciiva.com/1040/glfrseries-1040697.pdf?src-supplier=Digi-Key; ComponentLink3Description: https://datasheet.ciiva.com/1040/glfrseries-1040697.pdf?src-supplier=Digi-Key; ComponentLink4URL: https://datasheet.ciiva.com/30209/e531-glfr1608-30209531.pdf?src-supplier=Onlinecomponents.com; ComponentLink4Description: https://datasheet.ciiva.com/30209/e531-glfr1608-30209531.pdf?src-supplier=Onlinecomponents.com; Supplier Part Number 1: 1844011; Item Type: Inductor
footprint IND-0603 (1608 Metric) (0.063" L x 0.032" W (1.60mm x 0.80mm))
pins: 1, 2

## GT-TC025D-H0065-L1
designator SW?
No NO J pin 50mA 3mm 100MΩ 100000 12V 250gf@±30gf 2.6mm -30℃~+85℃ 0.65mm Black Round Button Brick nogging SPST SMD Tactile Switches ROHS; Manufacturer: G-Switch; Manufacturer Part Number: GT-TC025D-H0065-L1; ComponentLink1Description: LCSC; ComponentLink1URL: https://www.lcsc.com/product-detail/Tactile-Switches_G-Switch-GT-TC025D-H0065-L1_C778132.html; LCSC Part Number: C778132; Item Type: Tactile Switch
footprint GT-TC025D-H0065-L1.
pins: 1, 2, 3, 4

## GT-TC074E-H080-L1
designator SW?
No NO 50mA 100MΩ 100000 Times 12V 130gf@±30gf Brick nogging SPST SMD Tactile Switches ROHS; Manufacturer: G-Switch; Manufacturer Part Number: GT-TC074E-H080-L1; Package: SMD; LCSC Part Number: C963229; Item Type: Tactile Switch; ComponentLink1Description: LCSC; ComponentLink1URL: https://www.lcsc.com/product-detail/Tactile-Switches_G-Switch-GT-TC074E-H080-L1_C963229.html
footprint GT-TC074E-H080-L1
pins: 1, 2, 3, 4

## GT-TF003-H0185-02
designator J?
-40℃~+90℃ 1.85mm Gold plating Deck MicroSD card (TF card) High Conductivity Copper Self bomb SMD SD Card Connectors ROHS; Manufacturer: G-Switch; Manufacturer Part Number: GT-TF003-H0185-02; Package: SMD; LCSC Part Number: C5155564; Item Type: MicroSD card; ComponentLink1Description: LCSC; ComponentLink1URL: https://www.lcsc.com/product-detail/SD-Card-Connectors_G-Switch-GT-TF003-H0185-02_C5155564.html
footprint GT-TF003-H0185-02
pins: 1 DAT2, 2 CD/DAT3, 3 CMD, 4 VDD, 5 CLK, 6 VSS, 7 DAT0, 8 DAT1, cd CD, S1 SHIELD, S2 SHIELD, S3 SHIELD, S4 SHIELD

## GVT1C331M0607
designator C?, comment 330uF
330uF 16V ±20% SMD,D6.3xL7.7mm Aluminum Electrolytic Capacitors - SMD ROHS; Manufacturer: Honor Elec; Manufacturer Part Number: GVT1C331M0607; Package: SMD,D6.3xL7.7mm; LCSC Part Number: C2980164; Item Type: Capacitor; ComponentLink1Description: LCSC; ComponentLink1URL: https://www.lcsc.com/product-detail/Aluminum-Electrolytic-Capacitors-SMD_Honor-Elec-GVT1C331M0607_C2980164.html
footprint GVT1C331M0607
pins: 1, 2

## GVT1C561M0810
designator C?, comment 560uF
560uF 16V ±20% SMD,D8xL10.5mm Aluminum Electrolytic Capacitors - SMD ROHS; Manufacturer: Honor Elec; Manufacturer Part Number: GVT1C561M0810; Package: SMD,D8xL10.5mm; LCSC Part Number: C2980166; Item Type: Capacitor; ComponentLink1Description: LCSC; ComponentLink1URL: https://www.lcsc.com/product-detail/span-style-background-color-ff0-Aluminum-span-span-style-background-color-ff0-Electrolytic-span-span-style-background-color-ff0-Capacitors-span-span-style-background-color-ff0-SMD-span_Honor-Elec-GVT1C561M0810_C2980166.html
footprint GVT1C561M0810
pins: 1, 2

## GXHTC3
designator U?
DFN-6-EP(2x2) Temperature and Humidity Sensor ROHS; Manufacturer: GXCAS; Manufacturer Part Number: GXHTC3; Item Type: Temperature & Humidity Sensor; Package: DFN-6-EP(2x2); LCSC Part Number: C2837688; ComponentLink1Description: LCSC; ComponentLink1URL: https://www.lcsc.com/product-detail/Temperature-and-Humidity-Sensor_GXCAS-GXHTC3_C2837688.html
footprint DFN-6-EP(2x2)
pins: 1 VDD, 2 NC, 3 SCL, 4 SDA, 5 NC, 6 GND, 7 GND

## HA0200500000G
designator J?
TERM BLK 2POS TOP ENT 5.08MM PCB; Manufacturer: Amphenol; Manufacturer Part Number: HA0200500000G; Item Type: Terminal Block; Supplier 1: Arrow Electronics; RoHS: Yes; Stock 1: 120; Pricing 1: 2160=0.34600, 2520=0.34400, 3600=0.29460, 9000=0.29270, 18000=0.29070, 45000=0.28890, 90000=0.28680 (USD); Terminal and Terminal Block Type: BARRIER STRIP TERMINAL BLOCK; RoHS Compliant: Yes; Reach SVHC Compliant: Yes; ComponentLink1URL: https://datasheet.ciiva.com:443/pdfs/VipMasterIC/IC/AMPH/AMPH-S-A0005047712/AMPH-S-A0005047712-1.pdf?src-supplier=IHS+Markit; ComponentLink1Description: https://datasheet.ciiva.com:443/pdfs/VipMasterIC/IC/AMPH/AMPH-S-A0005047712/AMPH-S-A0005047712-1.pdf?src-supplier=IHS+Markit; Supplier Part Number 1: HA0200500000G; LCSC Part Number: C967080
footprint HA0200500000G
pins: 1, 2, 3, 4

## HC-12 Module
designator U?
433Mhz SI4463 HC-12 Wireless Serial Port Module; ComponentLink1Description: Aliexpress; ComponentLink1URL: https://www.aliexpress.com/item/1005002117548373.html?spm=a2g0o.productlist.main.1.451c79c6Vo7dNy&algo_pvid=93082d1e-6c79-45a0-b51e-4c9c862db0c1&algo_exp_id=93082d1e-6c79-45a0-b51e-4c9c862db0c1-0&pdp_ext_f=%7B%22sku_id%22%3A%2212000018797976000%22%7D&pdp_npi=2%40dis%21USD%214.4%213.74%21%21%21%21%21%4021224e9b16655822763592696d06c5%2112000018797976000%21sea&curPageLogUid=P8YFabe8JKJ6; Manufacturer Part Number: HC-12
footprint HC-12 Module
pins: 1 VCC, 2 GND, 3 RXD, 4 TXD, 5 SET, 6 ANT, 7 GND, 8 GND, 9 NC

## HC-XH-2A-G
designator J?
1x2P XH 1 2.54mm 2.54mm Male pin 2 -25℃~+85℃ 3A Straight Straight,P=2.5mm Wire To Board / Wire To Wire Connector ROHS; Manufacturer: HCTL; Manufacturer Part Number: HC-XH-2A-G; Item Type: JST Connector; Package: Straight,P=2.5mm; LCSC Part Number: C5341201; ComponentLink1Description: LCSC; ComponentLink1URL: https://www.lcsc.com/product-detail/Wire-To-Board-Wire-To-Wire-Connector_HCTL-HC-XH-2A-G_C5341201.html
footprint HC-XH-2A-G
pins: 1, 2

## HCM4920000000ABJT
designator X?, comment 20MHz
CRYSTAL 20.0000MHZ 18PF SMD; Manufacturer: CITIZEN; Manufacturer Part Number: HCM4920000000ABJT; Crystal Type: Passive SMD Crystal; Frequency Tolerance: 30ppm; ESR (Equivalent Series Resistance): 50R; Package: HCM-49SMD; Supplier 1: Digi-Key; RoHS: Yes; Category: Crystals; Stock 1: 172067; Pricing 1: 1=0.60000, 10=0.50000, 50=0.45000, 100=0.40000, 500=0.38000 (USD); Mount: Surface Mount; Min Operating Temperature: -40°C; Max Operating Temperature: 85°C; Load Capacitance: 18pF; Frequency: 20MHz; Lead Free: Lead Free; RoHS Compliant: Yes; ComponentLink1URL: https://datasheet.ciiva.com/16207/hcm49-16207144.pdf?src-supplier=Future+Electronics; ComponentLink1Description: https://datasheet.ciiva.com/16207/hcm49-16207144.pdf?src-supplier=Future+Electronics; Supplier Part Number 1: 300-6142-1-ND; LCSC Part Number: C326545
footprint HCM4920000000ABJT (CRYSTAL 20.0000MHZ 18PF SMD)
pins: 1 OSC1, 2 OSC2

## HDC2022DEPR
designator U?
SENSOR MULT HUMIDITY/TEMP; Manufacturer: Texas Instruments; Manufacturer Part Number: HDC2022DEPR; Supplier: Mouser; Supplier Part Number: 595-HDC2022DEPR; RoHS: Yes; Category: Integrated Circuits (ICs); Stock: 5312; Pricing: 1=4.2, 10=2.66, 50=2.66, 100=2.58, 1000=2.02, 10000=1.94 (USD); Item Type: Sensor
footprint HDC2022DEPR
pins: 1 SDA, 2 GND, 3 ADDR, 4 DRDY/INT, 5 VDD, 6 SCL

## HDC2080DMBT
designator U?
HUMIDITY SENSOR; Manufacturer: Texas Instruments; Manufacturer Part Number: HDC2080DMBT; Item Type: Temperature and Humidity Sensor; Supplier: Mouser; Supplier Part Number: 595-HDC2080DMBT; RoHS: Yes; Category: Integrated Circuits (ICs); Stock: 8942; Pricing: 1=4.78, 10=3.59, 50=3.59, 100=2.92, 1000=2.28, 10000=2.21 (USD); ComponentLink1URL: http://www.ti.com/general/docs/suppproductinfo.tsp?distId=10&amp;gotoUrl=http%3A%2F%2Fwww.ti.com%2Flit%2Fgpn%2Fhdc2080&src-supplier=Digi-Key; ComponentLink1Description: http://www.ti.com/general/docs/suppproductinfo.tsp?distId=10&amp;gotoUrl=http%3A%2F%2Fwww.ti.com%2Flit%2Fgpn%2Fhdc2080&src-supplier=Digi-Key; ComponentLink2URL: http://www.ti.com/lit/ds/symlink/hdc2080.pdf?src-supplier=Digi-Key; ComponentLink2Description: http://www.ti.com/lit/ds/symlink/hdc2080.pdf?src-supplier=Digi-Key; LCSC Part Number: C266121
footprint HDC2080DMBT (DFN-6(3x3))
pins: 1 SDA, 2 GND, 3 ADDR, 4 DRDY/INT, 5 VDD, 6 SCL, 7 EP